# Altium footprint library 光耦.PcbLib: 1 footprints
Each footprint in its own frame and in the unit in brackets; x right, y up, seen from the top. Pads: shape width x height; smd on the part's side, far side on the other; paste and mask are expansions set on the pad; w line width, h text height; cw(c..) or ccw(c..) is an arc to the next point about the centre after c.
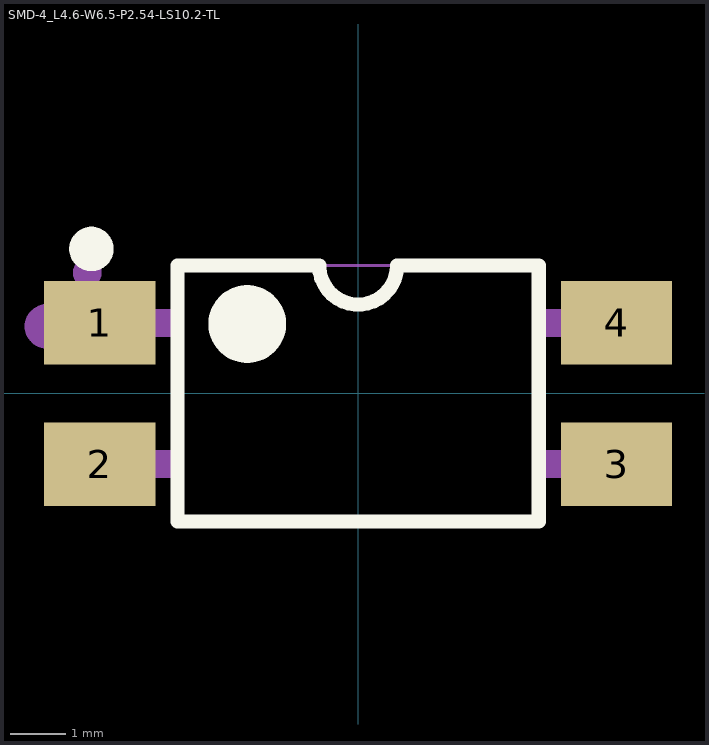
[diagram p0: the footprint, top view; thin cyan lines are the x and y axes]

## SMD-4_L4.6-W6.5-P2.54-LS10.2-TL [mm]
pads (4):
  rect 2x1.5 smd: 1(-4.65,1.27) 2(-4.65,-1.27) 3(4.65,-1.27) 4(4.65,1.27)
Top Overlay:
  lines w0.254: -0.701,2.301 ccw(c-0.001,2.301) 0.7,2.3 3.25,2.3 3.25,-2.3 -3.25,-2.3 -3.25,2.3 -0.7,2.3
  lines w0.4: -4.8,2.8 ccw(c-4.799,2.6) -4.798,2.8
  lines w0.7: -1.999,1.6 ccw(c-1.996,1.25) -1.994,1.6
Mechanical 2:
  circle w0.4: c-5.6,1.208 r0.2
Mechanical 6:
  lines w0.051: -3.25,-2.3 -3.25,2.3 3.25,2.3 3.25,-2.3 -3.25,-2.3
Mechanical 7:
  region: 3.19,1.52 4.51,1.52 4.51,1.02 3.19,1.02
  region: 3.19,-1.02 4.51,-1.02 4.51,-1.52 3.19,-1.52
  region: -4.51,-1.02 -3.19,-1.02 -3.19,-1.52 -4.51,-1.52
  region: -4.51,1.52 -3.19,1.52 -3.19,1.02 -4.51,1.02
Mechanical 8:
  region: -4.619,2.173 -4.619,2.122 -4.658,2.029 -4.729,1.958 -4.822,1.919 -4.923,1.919 -5.017,1.958 -5.088,2.029 -5.127,2.122 -5.127,2.173 -5.127,2.223 -5.088,2.317 -5.017,2.388 -4.923,2.427 -4.822,2.427 -4.729,2.388 -4.658,2.317 -4.619,2.223 -4.619,2.173
Mechanical 9:
  region: 4.5,1.52 5,1.52 5,1.02 4.5,1.02
  region: 4.5,-1.02 5,-1.02 5,-1.52 4.5,-1.52
  region: -5,-1.02 -4.5,-1.02 -4.5,-1.52 -5,-1.52
  region: -5,1.52 -4.5,1.52 -4.5,1.02 -5,1.02